# Altium schematic symbol library TAD5242IRGER.SchLib: 1 symbol
Pins are listed as number, name and electrical type; pins without a type are passive.

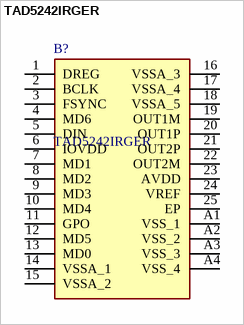
[diagram p0: symbol TAD5242IRGER]

## TAD5242IRGER
designator B?
Audio D/A Converter ICs Hardware-control stereo audio DAC with 120dB dynamic range, and headphone and line driver; Manufacturer_Name: Texas Instruments; Geometry.Height: 1mm; Manufacturer_Part_Number: TAD5242IRGER; Mouser Part Number: 595-TAD5242IRGER; Mouser Price/Stock: https://www.mouser.co.uk/ProductDetail/Texas-Instruments/TAD5242IRGER?qs=%252BXxaIXUDbq07iiss%252B1zA7A%3D%3D; Arrow Part Number: TAD5242IRGER; Arrow Price/Stock: https://www.arrow.com/en/products/tad5242irger/texas-instruments?utm_currency=USD&region=nac; Datasheet Link: https://www.ti.com/lit/ds/symlink/tad5242.pdf?ts=1736249226355&ref_url=https%253A%252F%252Fwww.ti.com%252Fproduct%252FTAD5242
footprint TAD5242IRGER
pins: 1 DREG, 2 BCLK, 3 FSYNC, 4 MD6, 5 DIN, 6 IOVDD, 7 MD1, 8 MD2, 9 MD3, 10 MD4, 11 GPO, 12 MD5, 13 MD0, 14 VSSA_1, 15 VSSA_2, 16 VSSA_3, 17 VSSA_4, 18 VSSA_5, 19 OUT1M, 20 OUT1P, 21 OUT2P, 22 OUT2M, 23 AVDD, 24 VREF, 25 EP, A1 VSS_1, A2 VSS_2, A3 VSS_3, A4 VSS_4